# Altium footprint library CSRT0603FT5R00.PcbLib: 3 footprints
Each footprint in its own frame and in the unit in brackets; x right, y up, seen from the top. Pads: shape width x height; smd on the part's side, far side on the other; paste and mask are expansions set on the pad; w line width, h text height; cw(c..) or ccw(c..) is an arc to the next point about the centre after c.
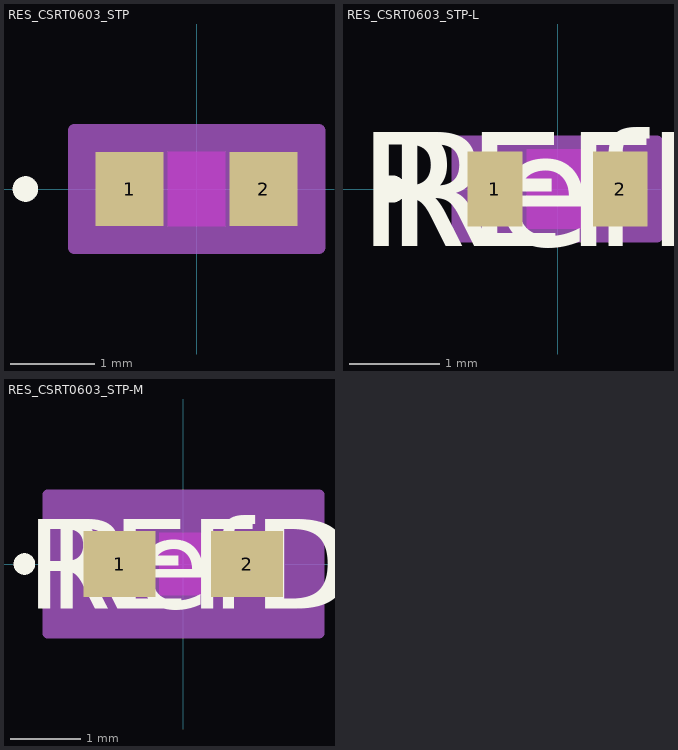
[diagram p0: the footprints below, top view; thin cyan lines are the x and y axes]

## RES_CSRT0603_STP [mil]
pads (2):
  rect 32x35 smd paste+0 mask+0: 1(-31.5,0) 2(31.5,0)
Top Layer keep-out:
  region: -13.5,-15.5 -13.5,15.5 13.5,15.5 13.5,-15.5
Top Overlay:
  circle w6: c-80.5,0 r3
Keep-Out Layer:
  region: -13.5,-17.5 -13.5,17.5 13.5,17.5 13.5,-17.5
Mechanical 13:
  circle w0: c-26.5,0 r3
  lines w1: -33.5,-17.5 -33.5,17.5 ; -33.5,-17.5 33.5,-17.5 ; -33.5,-17.5 -15.5,-17.5 -15.5,17.5 -33.5,17.5 ; -33.5,-17.5 -33.5,17.5 ; -33.5,17.5 33.5,17.5 ; 33.5,-17.5 33.5,17.5 ; 33.5,-17.5 33.5,17.5 ; 33.5,-17.5 15.5,-17.5 15.5,17.5 33.5,17.5
Mechanical 15:
  region: 57.5,-27.5 -57.5,-27.5 -57.5,27.5 57.5,27.5
  lines w6: -57.5,-27.5 57.5,-27.5 57.5,27.5 -57.5,27.5 -57.5,-27.5
3D body "RES_CSRT0603_STP.step": height 22.01, standoff 0, extent -33.5,-17.48 33.5,17.48

## RES_CSRT0603_STP-L [mil]
pads (2):
  rect 24x33 smd paste+0 mask+0: 1(-27.5,0) 2(27.5,0)
Top Layer keep-out:
  region: -13.5,-15.5 -13.5,15.5 13.5,15.5 13.5,-15.5
Top Overlay:
  circle w6: c-72.5,0 r3
  text "RefDes" at -75,-25 h50
  text "REFDES" at -87.5,-25 h50
Keep-Out Layer:
  region: -13.5,-17.5 -13.5,17.5 13.5,17.5 13.5,-17.5
Mechanical 13:
  circle w0: c-22.5,0 r3
  lines w1: -33.5,-17.5 -33.5,17.5 ; -33.5,-17.5 -15.5,-17.5 -15.5,17.5 -33.5,17.5 ; -33.5,-17.5 33.5,-17.5 ; -33.5,-17.5 -33.5,17.5 ; -33.5,17.5 33.5,17.5 ; 33.5,-17.5 15.5,-17.5 15.5,17.5 33.5,17.5 ; 33.5,-17.5 33.5,17.5 ; 33.5,-17.5 33.5,17.5
  text "RefDes2" at -87.5,-25 h50
Mechanical 15:
  region: 43.5,-20.5 -43.5,-20.5 -43.5,20.5 43.5,20.5
  lines w6: -43.5,-20.5 -43.5,20.5 43.5,20.5 43.5,-20.5 -43.5,-20.5
3D body "RES_CSRT0603_STP.step": height 22.01, standoff 0, extent -33.5,-17.48 33.5,17.48

## RES_CSRT0603_STP-M [mil]
pads (2):
  rect 40x37 smd paste+0 mask+0: 1(-35.5,0) 2(35.5,0)
Top Layer keep-out:
  region: -13.5,-15.5 -13.5,15.5 13.5,15.5 13.5,-15.5
Top Overlay:
  circle w6: c-88.5,0 r3
  text "RefDes" at -75,-25 h50
  text "REFDES" at -87.5,-25 h50
Keep-Out Layer:
  region: -13.5,-17.5 -13.5,17.5 13.5,17.5 13.5,-17.5
Mechanical 13:
  circle w0: c-30.5,0 r3
  lines w1: -33.5,-17.5 -33.5,17.5 ; -33.5,-17.5 -15.5,-17.5 -15.5,17.5 -33.5,17.5 ; -33.5,-17.5 33.5,-17.5 ; -33.5,-17.5 -33.5,17.5 ; -33.5,17.5 33.5,17.5 ; 33.5,-17.5 15.5,-17.5 15.5,17.5 33.5,17.5 ; 33.5,-17.5 33.5,17.5 ; 33.5,-17.5 33.5,17.5
  text "RefDes2" at -87.5,-25 h50
Mechanical 15:
  region: 75.5,-38.5 -75.5,-38.5 -75.5,38.5 75.5,38.5
  lines w6: -75.5,-38.5 -75.5,38.5 75.5,38.5 75.5,-38.5 -75.5,-38.5
3D body "RES_CSRT0603_STP.step": height 22.01, standoff 0, extent -33.5,-17.48 33.5,17.48